# Altium footprint library CustomCase.PcbLib: 411 footprints (part 17 of 26)
Each footprint in its own frame and in the unit in brackets; x right, y up, seen from the top. Pads: shape width x height; smd on the part's side, far side on the other; paste and mask are expansions set on the pad; w line width, h text height; cw(c..) or ccw(c..) is an arc to the next point about the centre after c.
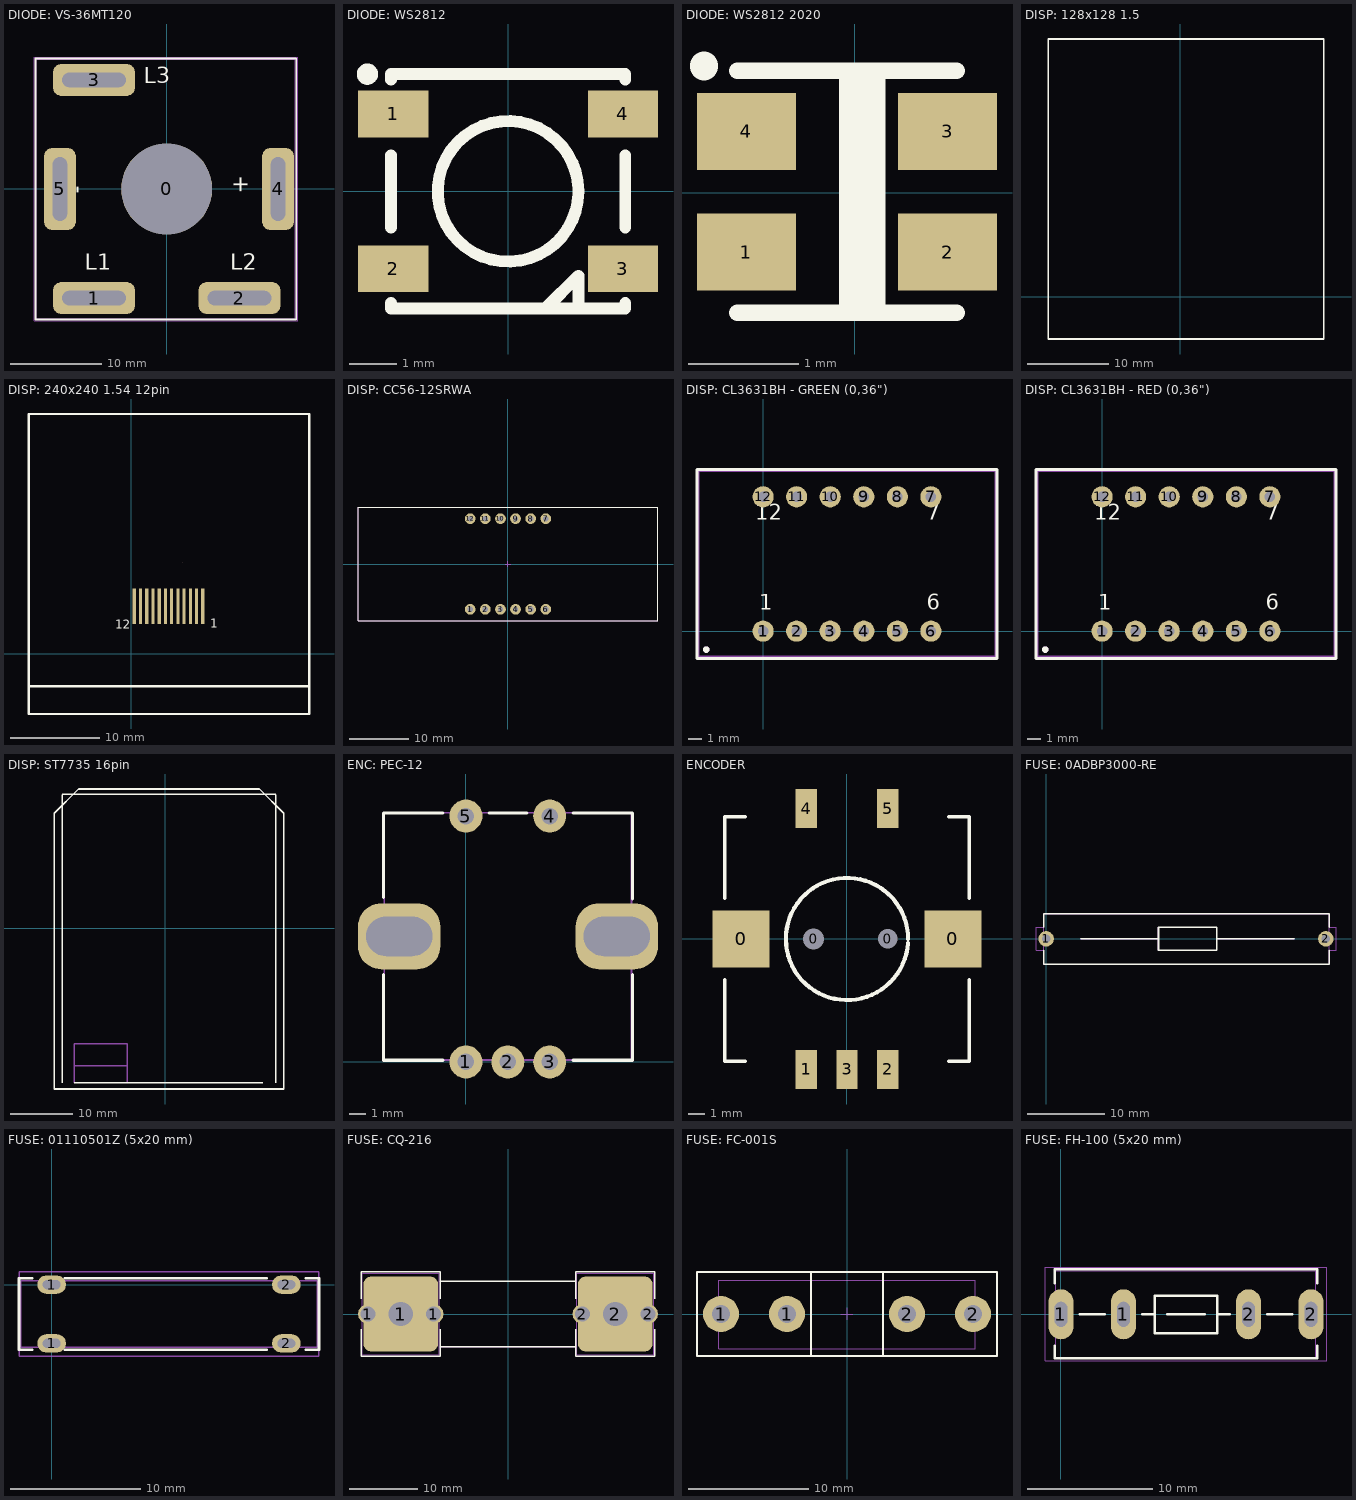
[diagram p16: the footprints below, top view; thin cyan lines are the x and y axes]

## DIODE: VS-36MT120 [mm]
pads (6):
  round 10 hole 10: 0(0,0)
  rrect50% 9x3.5 hole 1.6 slot 7 at 0 deg: 1(-8,-12) 2(8,-12) 3(-8,12)
  rrect50% 3.5x9 hole 1.6 slot 7 at 90 deg: 4(12.25,0) 5(-11.75,0)
Top Overlay:
  lines w0.2: -14.45,-14.35 14.25,-14.35 14.25,14.35 -14.45,14.35 -14.45,-14.35
  text "L1" at -9,-9.5 h3
  text "L3" at -2.5,11 h3
  text "L2" at 7,-9.5 h3
  text "+" at 9.5,-0.5 h3
  text "-" at -8.5,-0.5 h3
Top Assy:
  lines w0.1: -14.35,-14.25 -14.35,14.25 14.15,14.25 14.15,-14.25 -14.35,-14.25
Size Area:
  lines w0.1: -14.6,-14.5 -14.6,14.5 14.4,14.5 14.4,-14.5 -14.6,-14.5
3D body "D-63.stp": height 16, standoff -6, extent -14.35,-14.25 14.15,14.25

## DIODE: WS2812 [mm]
pads (4):
  rect 1.501x0.998 smd: 1(-2.45,1.65) 2(-2.45,-1.65)
  rect 1.499x0.998 smd: 3(2.45,-1.65) 4(2.45,1.65)
Top Overlay:
  circle w0.254: c-3,2.5 r0.1
  circle w0.254: c0,0 r1.5
  lines w0.254: -2.5,-2.38 -2.5,-2.5 2.5,-2.5 2.5,-2.38 ; -2.5,-0.77 -2.5,0.77 ; -2.5,2.38 -2.5,2.5 2.5,2.5 2.5,2.38 ; 2.5,-0.77 2.5,0.77 ; 0.8,-2.5 1.5,-1.8 1.5,-2.5 0.8,-2.5
3D body "User Library-ws2812B-1.step": height 1.5, standoff -0.07, extent -2.7,-2.5 2.7,2.5

## DIODE: WS2812 2020 [mm]
pads (4):
  rect 0.9x0.7 smd: 1(-0.987,-0.542) 2(0.843,-0.542) 3(0.843,0.558) 4(-0.987,0.558)
Top Overlay:
  lines w0.15: -0.072,-1.092 -0.072,1.108 ; 0.203,-1.092 0.203,1.108
  lines w0.152: -1.072,-1.092 0.928,-1.092 ; -1.072,1.108 0.928,1.108
  lines w0.2: 0.075,-1.05 0.075,1.075
  lines w0.254: -1.372,1.146 -1.372,1.158
Size Area:
  region: -0.892,-0.372 -0.652,-0.372 -0.652,-0.552 -0.862,-0.552 -0.862,-0.662 -0.652,-0.662 -0.652,-0.712 -0.892,-0.712 -0.902,-0.712 -0.902,-0.702 -0.902,-0.512 -0.682,-0.512 -0.682,-0.412 -0.902,-0.412 -0.902,-0.372
  region: -1.252,-0.657 -1.012,-0.657 -1.012,-0.707 -1.252,-0.707
  region: 0.583,0.463 0.583,0.703 0.633,0.703 0.633,0.463
  region: 0.488,0.608 0.728,0.608 0.728,0.558 0.488,0.558
  region: 0.878,0.758 0.878,0.458 1.028,0.458 1.028,0.358 1.078,0.358 1.078,0.458 1.178,0.458 1.178,0.508 1.078,0.508 1.078,0.658 1.028,0.658 1.028,0.508 0.928,0.508 0.928,0.758
  region: -0.872,0.708 -0.922,0.658 -0.922,0.358 -0.872,0.308 -0.672,0.308 -0.622,0.358 -0.622,0.658 -0.672,0.708 -0.772,0.708 -0.772,0.658 -0.672,0.658 -0.672,0.358 -0.872,0.358 -0.872,0.658 -0.822,0.658 -0.822,0.708
  region: -1.247,0.708 -1.247,0.308 -1.097,0.308 -1.047,0.308 -0.997,0.358 -0.997,0.658 -1.047,0.708 -1.147,0.708 -1.147,0.658 -1.047,0.658 -1.047,0.358 -1.197,0.358 -1.197,0.708
  region: 0.478,-0.342 0.478,-0.742 0.628,-0.742 0.678,-0.742 0.728,-0.692 0.728,-0.392 0.678,-0.342 0.578,-0.342 0.578,-0.392 0.678,-0.392 0.678,-0.692 0.528,-0.692 0.528,-0.342
  region: 0.853,-0.742 0.853,-0.692 0.903,-0.692 0.903,-0.392 0.853,-0.392 0.853,-0.342 1.003,-0.342 1.003,-0.392 0.953,-0.392 0.953,-0.692 1.003,-0.692 1.003,-0.742
3D body "WS2812-2020.step": height 0.84, standoff 0, extent -1.151,-1 1.049,1

## DISP: 128x128 1.5 [mm]
Top Overlay:
  lines w0.2: -16.2,-5.189 -16.2,31.615 17.6,31.615 17.6,-5.189 -16.2,-5.189
3D body "OLED-RGB-1_5inch.step": height 1.32, standoff -2.52, extent -16.2,-5.189 17.6,31.615

## DISP: 240x240 1.54 12pin [mm]
pads (12):
  rect 0.35x4 smd paste+0.102 mask+0.102: 1(8.066,5.354) 2(7.366,5.354) 3(6.666,5.354) 4(5.966,5.354) 5(5.266,5.354) 6(4.566,5.354) 7(3.866,5.354) 8(3.166,5.354) 9(2.466,5.354) 10(1.766,5.354) 11(1.066,5.354) 12(0.366,5.354)
Top Overlay:
  lines w0.254: -11.365,-3.663 20.004,-3.663 ; -11.492,-6.776 20.028,-6.776 20.028,26.944 -11.492,26.944 -11.492,-6.776
  text "1" at 8.928,2.903 h1
  text "12" at -1.797,2.828 h1
Size Area:
  lines w0.003: 5.792,10.211 5.792,10.211
3D body "1.54 TFT IPS - 12P - Flat Flush Mount.stp": height 1.37, standoff -0.17, extent -11.469,-6.916 19.925,26.866

## DISP: CC56-12SRWA [mm]
height 8.1
pads (12):
  round 1.8 hole 0.9: 1(-6.35,-7.62) 2(-3.81,-7.62) 3(-1.27,-7.62) 4(1.27,-7.62) 5(3.81,-7.62) 6(6.35,-7.62) 7(6.35,7.62) 8(3.81,7.62) 9(1.27,7.62) 10(-1.27,7.62) 11(-3.81,7.62) 12(-6.35,7.62)
Top Overlay:
  lines w0.2: -25.2,-9.5 25.2,-9.5 25.2,9.5 -25.2,9.5 -25.2,-9.5
Top Assy:
  lines w0.1: -25.2,-9.5 25.2,-9.5 25.2,9.5 -25.2,9.5 -25.2,-9.5
Size Area:
  lines w0.1: -0.5,0 0.5,0 ; 0,-0.5 0,0.5 ; -25.2,-9.5 -25.2,9.5 25.2,9.5 25.2,-9.5 -25.2,-9.5
3D body "User Library-C-564 (7 segment 4 digit LED display).STEP": height 8, standoff -6.2, extent -25.2,-9.5 25.2,9.5

## DISP: CL3631BH - GREEN (0,36") [mm]
pads (14):
  round 1.6 hole 0.8: 1(0,0) 2(2.54,0) 3(5.08,0) 4(7.62,0) 5(10.16,0) 6(12.7,0) 7(12.7,10.16) 8(10.16,10.16) 9(7.62,10.16) 10(5.08,10.16) 11(2.54,10.16) 12(0,10.16)
  round 0.5 on Mech1: ""(-4.3,-1.4)
  round 0.5 on Top Overlay: ""(-4.3,-1.4)
Top Overlay:
  lines w0.2: -5,-2.075 -5,12.225 17.7,12.225 17.7,-2.075 -5,-2.075
  text "1" at -0.3,1.2 h2
  text "6" at 12.4,1.2 h2
  text "7" at 12.4,8 h2
  text "12" at -0.6,8 h2
Top Assy:
  lines w0.1: -4.85,-1.92 -4.85,12.08 17.55,12.08 17.55,-1.92 -4.85,-1.92
Size Area:
  lines w0.1: -4.95,-2.025 -4.95,12.175 17.65,12.175 17.65,-2.025 -4.95,-2.025
3D body "User Library-3631_Green_jam.STEP": height 7.1, standoff -5.5, extent -4.85,-1.92 17.55,12.08

## DISP: CL3631BH - RED (0,36") [mm]
pads (14):
  round 1.6 hole 0.8: 1(0,0) 2(2.54,0) 3(5.08,0) 4(7.62,0) 5(10.16,0) 6(12.7,0) 7(12.7,10.16) 8(10.16,10.16) 9(7.62,10.16) 10(5.08,10.16) 11(2.54,10.16) 12(0,10.16)
  round 0.5 on Mech1: ""(-4.3,-1.4)
  round 0.5 on Top Overlay: ""(-4.3,-1.4)
Top Overlay:
  lines w0.2: -5,-2.075 17.7,-2.075 17.7,12.225 -5,12.225 -5,-2.075
  text "12" at -0.6,8 h2
  text "7" at 12.4,8 h2
  text "6" at 12.4,1.2 h2
  text "1" at -0.3,1.2 h2
Top Assy:
  lines w0.1: -4.85,-1.92 17.55,-1.92 17.55,12.08 -4.85,12.08 -4.85,-1.92
Size Area:
  lines w0.1: -4.95,-2.025 17.65,-2.025 17.65,12.175 -4.95,12.175 -4.95,-2.025
3D body "User Library-3631_Red_jam.STEP": height 7.1, standoff -5.5, extent -4.85,-1.92 17.55,12.08

## DISP: ST7735 16pin [mm]
Top Overlay:
  lines w0.2: -16.421,-24.65 -16.421,21.35 ; -16.421,21.365 17.579,21.365 ; -14.571,-24.635 15.579,-24.635 ; 17.579,-24.65 17.579,21.35
  lines w0.25: -17.721,-25.635 18.879,-25.635 18.879,18.365 15.004,22.24 -13.846,22.24 -17.721,18.365 -17.721,-25.635
Size Area:
  lines w0.2: -14.571,-24.635 -14.571,-18.435 -6.071,-18.435 -6.071,-24.635 ; -14.571,-21.935 -6.071,-21.935
3D body "DIsplay_ST17702_w_Adapter.STEP": height 5.02, standoff -1.93, extent -17.571,-25.31 18.629,22.19

## ENC: PEC-12 [mm]
pads (7):
  round 2 hole 1: 1(0,0) 2(2.54,0) 3(5.08,0) 4(5.08,14.922) 5(0,14.922)
  rrect70% 5x4 hole 2.4 slot 4 at 0 deg: ""(-4.05,7.625) ""(9.15,7.625)
Top Overlay:
  lines w0.2: -5,5.3 -5,0.1 -1.4,0.1 ; -5,10 -5,15.1 -1.4,15.1 ; 1.4,15.1 3.7,15.1 ; 6.5,0.1 10.1,0.1 10.1,5.3 ; 6.5,15.1 10.1,15.1 10.1,9.9
Top Assy:
  lines w0.1: -4.966,0.12 -4.966,15.12 10.046,15.12 10.046,0.12 -4.966,0.12
3D body "User Library-rotacijski enkoder.STEP": height 16.5, standoff -4.53, extent -4.964,0.12 10.044,15.12

## ENCODER [mm]
pads (9):
  rect 3.5x3.5 smd: 0(-6.5,0) 0(6.5,0)
  round 1.1 hole 1.3 paste-2539.97 mask+0: 0(-2.048,0)
  round 1.1 hole 1.2 paste-2539.97 mask+0: 0(2.5,0)
  rect 1.3x2.4 smd: 1(-2.5,-8.004) 2(2.5,-8.004) 3(0,-8.004) 4(-2.5,8) 5(2.5,8)
Top Overlay:
  lines w0.2: -7.5,-2.5 -7.5,-7.502 -6.25,-7.502 ; -7.5,2.5 -7.5,7.5 -6.25,7.5 ; 6.25,-7.502 7.5,-7.502 7.5,-2.5 ; 6.25,7.5 7.5,7.5 7.5,2.5
  lines w0.254: 3.742,-0.249 cw(c0,0) 3.75,0
3D body "PEC11S-9225F-XXXXX.STP": height 29.9, standoff -0.9, extent -7.5,-9 7.5,9

## FUSE: 0ADBP3000-RE [mm]
pads (2):
  round 2 hole 1.1: 1(0,0) 2(36.1,0)
Top Overlay:
  lines w0.2: -0.31,-1.5 -0.31,-3.3 36.51,-3.3 36.51,-1.5 ; -0.31,1.5 -0.31,3.25 36.51,3.25 36.51,1.5 ; 4.5,0 14.5,0 ; 22,0 32,0 ; 14.5,0 14.5,1.5 22,1.5 22,-1.5 14.5,-1.5 14.5,0
Top Assy:
  lines w0.1: 4.5,0 14.5,0 ; 22,0 32,0 ; 14.5,0 14.5,-1.5 22,-1.5 22,1.5 14.5,1.5 14.5,0 ; -0.31,-3.3 36.51,-3.3 36.51,3.25 -0.31,3.25 -0.31,-3.3
Size Area:
  lines w0.1: -1.3,-1.5 -1.3,1.5 -0.31,1.5 -0.31,3.25 36.51,3.25 36.51,1.5 37.4,1.5 37.4,-1.5 36.51,-1.5 36.51,-3.3 -0.31,-3.3 -0.31,-1.5 -1.3,-1.5
3D body "fuse.STEP": height 6.78, standoff -1.8, extent -0.31,-3.3 36.51,3.25

## FUSE: 01110501Z (5x20 mm) [mm]
pads (4):
  oval 2.2x1.4 hole 0.7 slot 1.35 at 0 deg: 1(0,-4.5) 1(0,0) 2(18,-4.5) 2(18,0)
Top Overlay:
  lines w0.2: -1.5,-5 -2.5,-5 -2.5,0.5 -1.5,0.5 ; 1,-5 16.5,-5 ; 1,0.5 16.5,0.5 ; 19.5,-5 20.5,-5 20.5,0.5 19.5,0.5
Top Assy:
  lines w0.1: 20.35,-4.8 -2.35,-4.8 -2.35,0.3 20.35,0.3 ; 20.35,-4.8 20.35,0.3 ; 20.35,-4.8 20.35,-4.8 ; 20.35,0.3 20.35,0.3
Size Area:
  lines w0.1: -2.5,-5.5 20.5,-5.5 20.5,1 -2.5,1 -2.5,-5.5
3D body "User Library-FUSIVEL.STEP": height 8.5, standoff 3.5, extent -1,-4.7 19,0.3
3D body "01110501Z.STEP": height 7.25, standoff -3.1, extent 15.55,-4.8 20.35,0.3
3D body "01110501Z.STEP": height 7.25, standoff -3.1, extent -2.35,-4.8 2.45,0.3

## FUSE: CQ-216 [mm]
pads (6):
  round 2.9 hole 2.2: 1(-20.65,0) 1(-10.95,0) 2(10.95,0) 2(20.65,0)
  rrect20% 11x11 / inner round 5.5 / far side round 5.5 hole 3.6: 1(-15.8,0) 2(15.8,0)
Top Overlay:
  lines w0.2: -21.65,-2.25 -21.65,-6.2 -9.95,-6.2 -9.95,-2.25 ; -21.65,2.25 -21.65,6.2 -9.95,6.2 -9.95,2.25 ; -9.95,-4.8 9.95,-4.8 ; -9.95,4.8 9.95,4.8 ; 9.95,-2.25 9.95,-6.2 21.65,-6.2 21.65,-2.25 ; 9.95,2.25 9.95,6.2 21.65,6.2 21.65,2.25
Mechanical 14:
  lines w0.1: -10.15,-4.8 10.15,-4.8 ; -10.15,4.8 10.15,4.8 ; -21.45,-6 -21.45,6 -10.15,6 -10.15,-6 -21.45,-6 ; 10.15,-6 10.15,6 21.45,6 21.45,-6 10.15,-6
3D body "FUSH_BUSSMANN_1A3400-09.stp": height 18, standoff -3.8, extent 10.25,-5.948 21.35,5.948
3D body "FUSH_BUSSMANN_1A3400-09.stp": height 18, standoff -3.8, extent -21.35,-5.948 -10.25,5.948
3D body "FUSE_10X38_H_Part1.stp": height 17.3, standoff 7, extent -19,-5.15 19,5.15
3D body "FUSE_10X38_H_Part2.stp": height 17, standoff 7.3, extent -9,-4.85 9,4.85

## FUSE: FC-001S [mm]
height 15
pads (4):
  round 3 hole 1.5: 1(-10.5,0) 1(-5,0) 2(5,0) 2(10.5,0)
Top Overlay:
  lines w0.2: -3,-3.5 -3,3.5 ; 3,-3.5 3,3.5 ; -12.5,-3.5 -12.5,3.5 12.5,3.5 12.5,-3.5 -12.5,-3.5
Top Assy:
  lines w0.1: -3,-2.9 -3,2.8 ; 3,-2.9 3,2.8 ; -10.7,-2.9 10.7,-2.9 10.7,2.8 -10.7,2.8 -10.7,-2.9
Size Area:
  lines w0.1: -0.5,0 0.5,0 ; 0,-0.5 0,0.5 ; -12.5,-3.5 -12.5,3.5 12.5,3.5 12.5,-3.5 -12.5,-3.5
3D body "FC-001S.STEP": height 5.5, standoff -2.81, extent -10.7,-2.9 10.7,2.798

## FUSE: FH-100 (5x20 mm) [mm]
pads (4):
  oval 2x4 hole 2 slot 1 at 0 deg: 1(0,0) 1(5,0) 2(15,0) 2(20,0)
Top Overlay:
  lines w0.2: -0.5,-2.5 -0.5,-3.5 20.5,-3.5 20.5,-2.5 ; -0.5,2.5 -0.5,3.6 20.5,3.6 20.5,2.5 ; 1.5,0 3.5,0 ; 6.5,0 7.5,0 ; 8.5,0 11.5,0 ; 12.5,0 13.5,0 ; 16.5,0 18.5,0 ; 7.5,-1.5 7.5,1.5 12.5,1.5 12.5,-1.5 7.5,-1.5
Top Assy:
  lines w0.1: 1.5,0 3.5,0 ; 6.5,0 7.5,0 ; 12.5,0 13.5,0 ; 16.5,0 18.5,0 ; 7.5,0 7.5,1.5 12.5,1.5 12.5,-1.5 7.5,-1.5 7.5,0 ; -0.4,-3.5 -0.4,3.5 20.4,3.5 20.4,-3.5 -0.4,-3.5
Size Area:
  lines w0.1: -1.25,-3.7 -1.25,3.75 21.25,3.75 21.25,-3.7 -1.25,-3.7
3D body "User Library-Clips FH-100 with fuse 5x20.STEP": height 9.99, standoff -3.5, extent -0.4,-3.5 20.4,3.5